# Altium footprint library FootPrintLib_11.PcbLib: 376 footprints (part 16 of 24)
Each footprint in its own frame and in the unit in brackets; x right, y up, seen from the top. Pads: shape width x height; smd on the part's side, far side on the other; paste and mask are expansions set on the pad; w line width, h text height; cw(c..) or ccw(c..) is an arc to the next point about the centre after c.
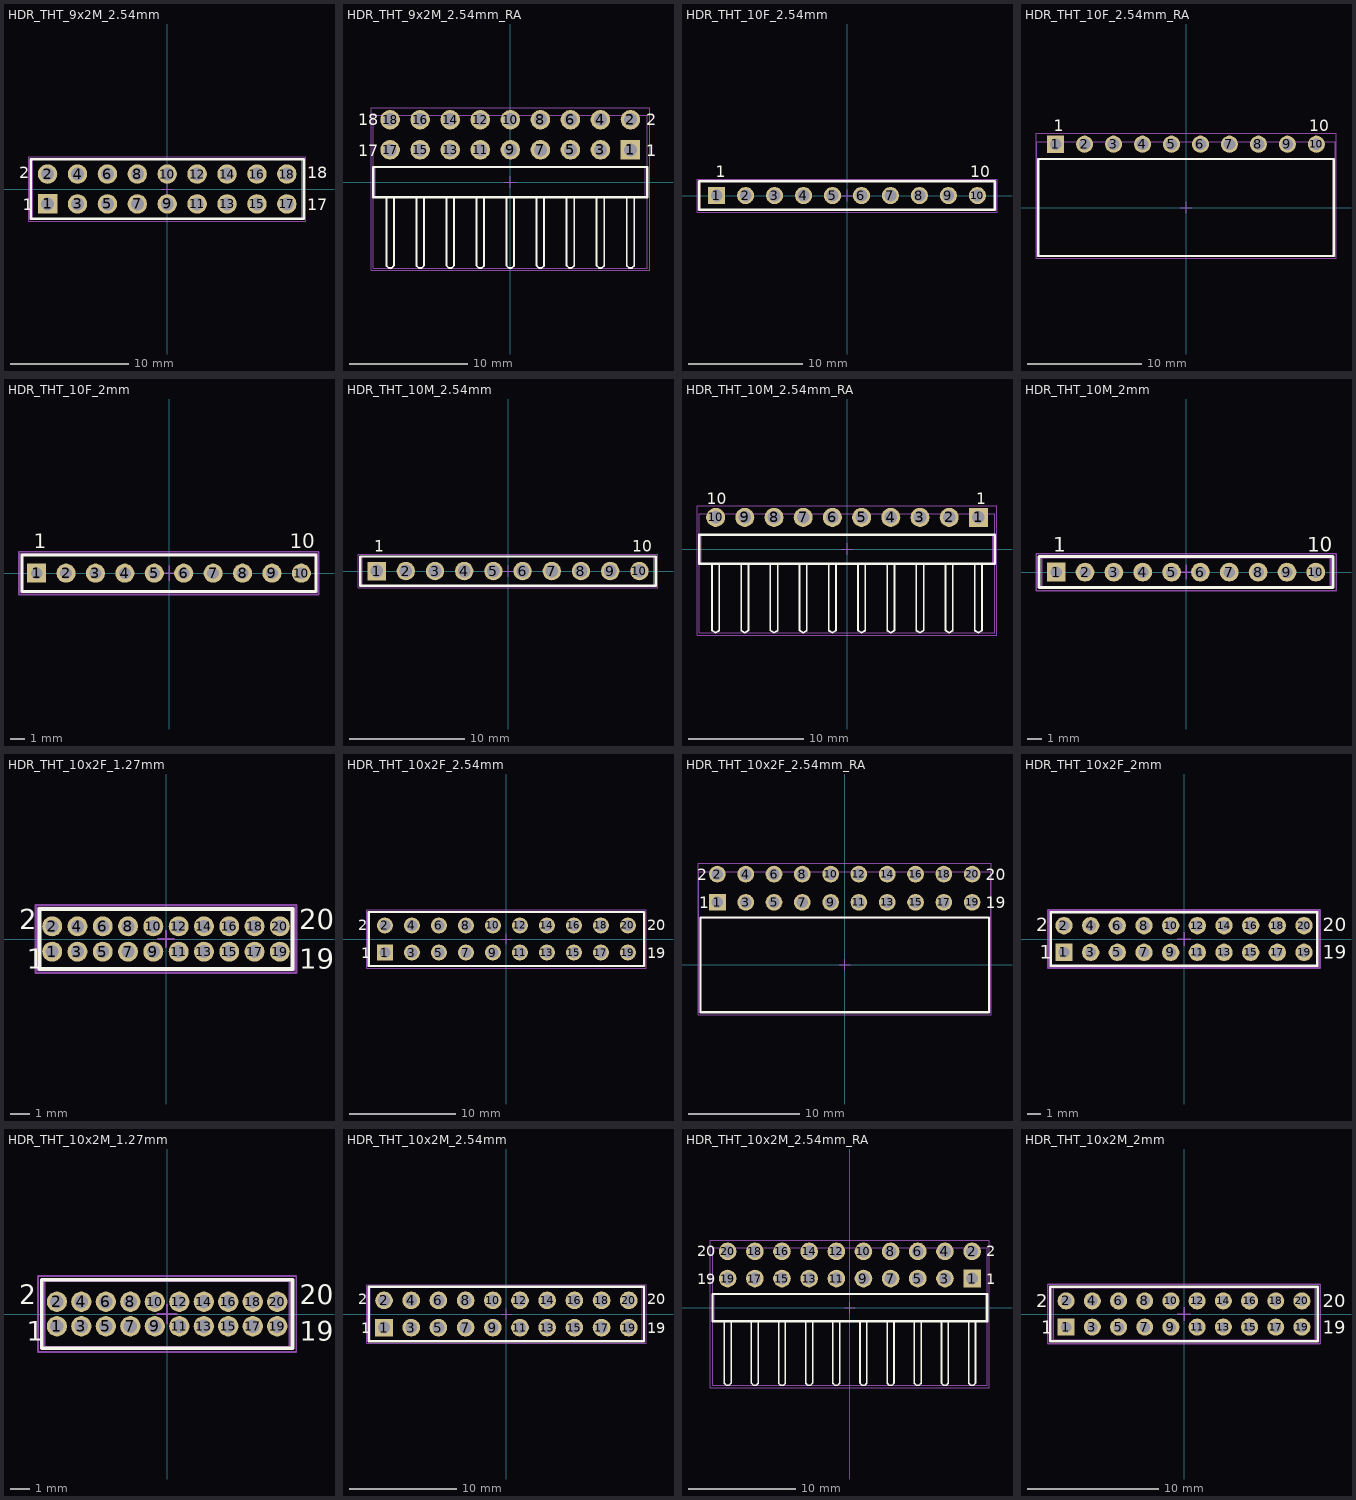
[diagram p15: the footprints below, top view; thin cyan lines are the x and y axes]

## HDR_THT_9x2M_2.54mm [mm] "Pin Header, pitch 2.54 mm, THT, Vertical, dual row, 18p"
height 8.54
pads (18):
  rect 1.65x1.65 hole 1.1: 1(-10.16,-1.27)
  round 1.65 hole 1.1: 2(-10.16,1.27) 3(-7.62,-1.27) 4(-7.62,1.27) 5(-5.08,-1.27) 6(-5.08,1.27) 7(-2.54,-1.27) 8(-2.54,1.27) 9(0,-1.27) 10(0,1.27) 11(2.54,-1.27) 12(2.54,1.27) 13(5.08,-1.27) 14(5.08,1.27) 15(7.62,-1.27) 16(7.62,1.27) 17(10.16,-1.27) 18(10.16,1.27)
Top Overlay:
  lines w0.2: -11.58,-2.54 -11.58,2.54 11.58,2.54 11.58,-2.54 -11.58,-2.54
  text "18" at 11.89,0.9 h1
  text "17" at 11.89,-1.8 h1
  text "2" at -12.59,0.9 h1
  text "1" at -12.29,-1.8 h1
Mechanical 11:
  lines w0.1: -11.43,-2.54 -11.43,2.54 11.43,2.54 11.43,-2.54 -11.43,-2.54
Mechanical 13:
  lines w0.1: -11.58,-2.54 -11.58,2.54 11.58,2.54 11.58,-2.54 -11.58,-2.54
Mechanical 15:
  lines w0.1: -0.5,0 0.5,0 ; 0,-0.5 0,0.5 ; -11.78,-2.74 -11.78,2.74 11.78,2.74 11.78,-2.74 -11.78,-2.74
3D body "61301821121.stp": height 8.59, standoff -2.95, extent -11.43,-2.54 11.43,2.54

## HDR_THT_9x2M_2.54mm_RA [mm] "Pin Header, pitch 2.54 mm, THT, Angled, dual row, 18p"
height 5.08
pads (18):
  rect 1.65x1.65 hole 1.1: 1(10.16,2.73)
  round 1.65 hole 1.1: 2(10.16,5.27) 3(7.62,2.73) 4(7.62,5.27) 5(5.08,2.73) 6(5.08,5.27) 7(2.54,2.73) 8(2.54,5.27) 9(0,2.73) 10(0,5.27) 11(-2.54,2.73) 12(-2.54,5.27) 13(-5.08,2.73) 14(-5.08,5.27) 15(-7.62,2.73) 16(-7.62,5.27) 17(-10.16,2.73) 18(-10.16,5.27)
Top Overlay:
  lines w0.15: -10.48,-1.335 -10.48,-7.07 -10.28,-7.27 -10.04,-7.27 -9.84,-7.07 -9.84,-1.31 ; -7.94,-1.335 -7.94,-7.07 -7.74,-7.27 -7.5,-7.27 -7.3,-7.07 -7.3,-1.31 ; -5.4,-1.335 -5.4,-7.07 -5.2,-7.27 -4.96,-7.27 -4.76,-7.07 -4.76,-1.31 ; -2.86,-1.335 -2.86,-7.07 -2.66,-7.27 -2.42,-7.27 -2.22,-7.07 -2.22,-1.31 ; -0.32,-1.335 -0.32,-7.07 -0.12,-7.27 0.12,-7.27 0.32,-7.07 0.32,-1.31 ; 2.22,-1.335 2.22,-7.07 2.42,-7.27 2.66,-7.27 2.86,-7.07 2.86,-1.31 ; 4.76,-1.335 4.76,-7.07 4.96,-7.27 5.2,-7.27 5.4,-7.07 5.4,-1.31 ; 7.3,-1.335 7.3,-7.07 7.5,-7.27 7.74,-7.27 7.94,-7.07 7.94,-1.31 ; 9.84,-1.335 9.84,-7.07 10.04,-7.27 10.28,-7.27 10.48,-7.07 10.48,-1.31
  lines w0.2: -11.58,-1.27 11.58,-1.27 11.58,1.27 -11.58,1.27 -11.58,-1.27
  text "2" at 11.49,4.8 h1
  text "1" at 11.49,2.2 h1
  text "18" at -12.88,4.8 h1
  text "17" at -12.88,2.2 h1
Mechanical 11:
  lines w0.1: -11.43,-1.27 11.43,-1.27 11.43,1.27 -11.43,1.27 -11.43,-1.27
Mechanical 13:
  lines w0.1: -11.58,-7.27 -11.58,5.63 11.58,5.63 11.58,-7.27 -11.58,-7.27
Mechanical 15:
  lines w0.1: -0.5,0 0.5,0 ; 0,-0.5 0,0.5 ; -11.78,-7.47 -11.78,6.295 11.78,6.295 11.78,-7.47 -11.78,-7.47
3D body "61301821021.stp": height 5.14, standoff -2.94, extent -11.43,-7.27 11.43,5.63

## HDR_THT_10F_2.54mm [mm] "Socket Header, Pitch 2.54 mm, THT, Vertical, single row, 10p"
height 8.5
pads (10):
  rect 1.5x1.5 hole 1.02: 1(-11.43,0)
  round 1.5 hole 1.02: 2(-8.89,0) 3(-6.35,0) 4(-3.81,0) 5(-1.27,0) 6(1.27,0) 7(3.81,0) 8(6.35,0) 9(8.89,0) 10(11.43,0)
Top Overlay:
  lines w0.2: -12.95,-1.25 -12.95,1.25 12.95,1.25 12.95,-1.25 -12.95,-1.25
  text "1" at -11.52,1.6 h1
  text "10" at 10.8,1.6 h1
Mechanical 11:
  lines w0.1: -12.95,-1.25 -12.95,1.25 12.95,1.25 12.95,-1.25 -12.95,-1.25
Mechanical 13:
  lines w0.1: -13.075,-1.25 13.075,-1.25 13.075,1.25 -13.075,1.25 -13.075,-1.25
Mechanical 15:
  lines w0.1: -0.5,0 0.5,0 ; 0,-0.5 0,0.5 ; -13.15,-1.45 13.15,-1.45 13.15,1.45 -13.15,1.45 -13.15,-1.45
3D body "61301011821.stp": height 8.55, standoff -3.06, extent -12.95,-1.25 12.95,1.25

## HDR_THT_10F_2.54mm_RA [mm] "Socket Header, Pitch 2.54 mm, THT, Angled, single row, 10p"
height 2.5
pads (10):
  rect 1.5x1.5 hole 1.02: 1(-11.43,5.55)
  round 1.5 hole 1.02: 2(-8.89,5.55) 3(-6.35,5.55) 4(-3.81,5.55) 5(-1.27,5.55) 6(1.27,5.55) 7(3.81,5.55) 8(6.35,5.55) 9(8.89,5.55) 10(11.43,5.55)
Top Overlay:
  lines w0.2: -12.95,-4.25 -12.95,4.25 12.95,4.25 12.95,-4.25 -12.95,-4.25
  text "10" at 10.8,6.7 h1
  text "1" at -11.59,6.7 h1
Mechanical 11:
  lines w0.1: -12.95,-4.25 12.95,-4.25 12.95,4.25 -12.95,4.25 -12.95,-4.25
Mechanical 13:
  lines w0.1: -13.075,-4.25 -13.075,5.75 13.075,5.75 13.075,-4.25 -13.075,-4.25
Mechanical 15:
  lines w0.1: -0.5,0 0.5,0 ; 0,-0.5 0,0.5 ; -13.15,-4.45 -13.15,6.5 13.15,6.5 13.15,-4.45 -13.15,-4.45
3D body "613010143121.stp": height 2.55, standoff -3.04, extent -12.95,-4.25 12.95,5.75

## HDR_THT_10F_2mm [mm] "Socket Header, Pitch 2.00 mm, THT, Vertical, single row, 10p"
height 4.45
pads (10):
  rect 1.3x1.3 hole 0.8: 1(-9,0)
  round 1.3 hole 0.8: 2(-7,0) 3(-5,0) 4(-3,0) 5(-1,0) 6(1,0) 7(3,0) 8(5,0) 9(7,0) 10(9,0)
Top Overlay:
  lines w0.2: -10,-1.25 -10,1.25 10,1.25 10,-1.25 -10,-1.25
  text "10" at 8.2,1.7 h1
  text "1" at -9.2,1.7 h1
Mechanical 11:
  lines w0.1: -10,-1.25 -10,1.25 10,1.25 10,-1.25 -10,-1.25
Mechanical 13:
  lines w0.1: -10.15,-1.325 -10.15,1.325 10.15,1.325 10.15,-1.325 -10.15,-1.325
Mechanical 15:
  lines w0.1: -0.5,0 0.5,0 ; 0,-0.5 0,0.5 ; -10.2,-1.45 -10.2,1.45 10.2,1.45 10.2,-1.45 -10.2,-1.45
3D body "62001011821.stp": height 4.35, standoff -2.65, extent -10.25,-1.25 10.25,1.25

## HDR_THT_10M_2.54mm [mm] "Pin Header, pitch 2.54 mm, THT, Vertical, single row, 10p"
height 8.54
pads (10):
  rect 1.6x1.6 hole 1.1: 1(-11.43,0)
  round 1.6 hole 1.1: 2(-8.89,0) 3(-6.35,0) 4(-3.81,0) 5(-1.27,0) 6(1.27,0) 7(3.81,0) 8(6.35,0) 9(8.89,0) 10(11.43,0)
Top Overlay:
  lines w0.2: -12.85,-1.27 12.85,-1.27 12.85,1.27 -12.85,1.27 -12.85,-1.27
  text "1" at -11.62,1.7 h1
  text "10" at 10.8,1.7 h1
Mechanical 11:
  lines w0.1: -12.7,-1.27 -12.7,1.27 12.7,1.27 12.7,-1.27 -12.7,-1.27
Mechanical 13:
  lines w0.1: -12.85,-1.27 12.85,-1.27 12.85,1.27 -12.85,1.27 -12.85,-1.27
Mechanical 15:
  lines w0.1: -0.5,0 0.5,0 ; 0,-0.5 0,0.5 ; -13.05,-1.47 13.05,-1.47 13.05,1.47 -13.05,1.47 -13.05,-1.47
3D body "61301011121.stp": height 8.57, standoff -2.97, extent -12.7,-1.27 12.7,1.27

## HDR_THT_10M_2.54mm_RA [mm] "Pin Header, pitch 2.54 mm, THT, Angled, single row, 10p"
height 2.54
pads (10):
  rect 1.65x1.65 hole 1.1: 1(11.43,2.77)
  round 1.65 hole 1.1: 2(8.89,2.77) 3(6.35,2.77) 4(3.81,2.77) 5(1.27,2.77) 6(-1.27,2.77) 7(-3.81,2.77) 8(-6.35,2.77) 9(-8.89,2.77) 10(-11.43,2.77)
Top Overlay:
  lines w0.15: -11.75,-1.27 -11.75,-7.07 -11.43,-7.27 -11.11,-7.07 -11.11,-1.27 ; -9.21,-1.27 -9.21,-7.07 -8.89,-7.27 -8.57,-7.07 -8.57,-1.27 ; -6.67,-1.27 -6.67,-7.07 -6.35,-7.27 -6.03,-7.07 -6.03,-1.27 ; -4.13,-1.27 -4.13,-7.07 -3.81,-7.27 -3.49,-7.07 -3.49,-1.27 ; -1.59,-1.27 -1.59,-7.07 -1.27,-7.27 -0.95,-7.07 -0.95,-1.27 ; 0.95,-1.27 0.95,-7.07 1.27,-7.27 1.59,-7.07 1.59,-1.27 ; 3.49,-1.27 3.49,-7.07 3.81,-7.27 4.13,-7.07 4.13,-1.27 ; 6.03,-1.27 6.03,-7.07 6.35,-7.27 6.67,-7.07 6.67,-1.27 ; 8.57,-1.27 8.57,-7.07 8.89,-7.27 9.21,-7.07 9.21,-1.27 ; 11.11,-1.27 11.11,-7.07 11.43,-7.27 11.75,-7.07 11.75,-1.27
  lines w0.2: -12.85,-1.27 12.85,-1.27 12.85,1.27 -12.85,1.27 -12.85,-1.27
  text "10" at -12.2,3.9 h1
  text "1" at 11.26,3.9 h1
Mechanical 11:
  lines w0.1: -12.7,-1.27 12.7,-1.27 12.7,1.27 -12.7,1.27 -12.7,-1.27
Mechanical 13:
  lines w0.1: -12.85,-7.27 -12.85,3.09 12.85,3.09 12.85,-7.27 -12.85,-7.27
Mechanical 15:
  lines w0.1: -0.5,0 0.5,0 ; 0,-0.5 0,0.5 ; -13.05,-7.47 -13.05,3.795 13.05,3.795 13.05,-7.47 -13.05,-7.47
3D body "61301011021.stp": height 2.62, standoff -2.92, extent -12.7,-7.27 12.7,3.09

## HDR_THT_10M_2mm [mm] "Pin Header, pitch 2.00 mm, THT, Vertical, single row, 10p"
height 6.35
pads (10):
  rect 1.3x1.3 hole 0.8: 1(-9,0)
  round 1.3 hole 0.8: 2(-7,0) 3(-5,0) 4(-3,0) 5(-1,0) 6(1,0) 7(3,0) 8(5,0) 9(7,0) 10(9,0)
Top Overlay:
  lines w0.2: -10.2,-1.075 10.2,-1.075 10.2,1.075 -10.2,1.075 -10.2,-1.075
  text "10" at 8.4,1.4 h1
  text "1" at -9.2,1.4 h1
Mechanical 11:
  lines w0.1: -10,-1 -10,1 10,1 10,-1 -10,-1
Mechanical 13:
  lines w0.1: -10.2,-1.075 10.2,-1.075 10.2,1.075 -10.2,1.075 -10.2,-1.075
Mechanical 15:
  lines w0.1: -0.5,0 0.5,0 ; 0,-0.5 0,0.5 ; -10.4,-1.275 10.4,-1.275 10.4,1.275 -10.4,1.275 -10.4,-1.275
3D body "62001011121.stp": height 6.05, standoff -2.65, extent -10,-1 10,1

## HDR_THT_10x2F_1.27mm [mm] "Socket Header, Pitch 1.27 mm, THT, Vertical, dual row, 20p"
height 4.65
pads (20):
  round 1 hole 0.65: 1(-5.715,-0.635) 2(-5.715,0.635) 3(-4.445,-0.635) 4(-4.445,0.635) 5(-3.175,-0.635) 6(-3.175,0.635) 7(-1.905,-0.635) 8(-1.905,0.635) 9(-0.635,-0.635) 10(-0.635,0.635) 11(0.635,-0.635) 12(0.635,0.635) 13(1.905,-0.635) 14(1.905,0.635) 15(3.175,-0.635) 16(3.175,0.635) 17(4.445,-0.635) 18(4.445,0.635) 19(5.715,-0.635) 20(5.715,0.635)
Top Overlay:
  lines w0.2: -6.35,-1.5 6.35,-1.5 6.35,1.5 -6.35,1.5 -6.35,-1.5
  text "2" at -7.38,0.5 h1
  text "1" at -6.98,-1.5 h1
  text "19" at 6.68,-1.5 h1
  text "20" at 6.68,0.5 h1
Mechanical 11:
  lines w0.1: -6.35,-1.5 6.35,-1.5 6.35,1.5 -6.35,1.5 -6.35,-1.5
Mechanical 13:
  lines w0.1: -6.475,-1.575 -6.475,1.575 6.475,1.575 6.475,-1.575 -6.475,-1.575
Mechanical 15:
  lines w0.1: -0.4,0 0.4,0 ; 0,-0.4 0,0.4 ; -6.55,-1.7 6.55,-1.7 6.55,1.7 -6.55,1.7 -6.55,-1.7
3D body "62202021821.stp": height 4.55, standoff -2.15, extent -6.55,-1.5 6.55,1.5

## HDR_THT_10x2F_2.54mm [mm] "Socket Header, Pitch 2.54 mm, THT, Vertical, dual row, 20p"
height 8.4
pads (20):
  rect 1.5x1.5 hole 1.02: 1(-11.43,-1.27)
  round 1.5 hole 1.02: 2(-11.43,1.27) 3(-8.89,-1.27) 4(-8.89,1.27) 5(-6.35,-1.27) 6(-6.35,1.27) 7(-3.81,-1.27) 8(-3.81,1.27) 9(-1.27,-1.27) 10(-1.27,1.27) 11(1.27,-1.27) 12(1.27,1.27) 13(3.81,-1.27) 14(3.81,1.27) 15(6.35,-1.27) 16(6.35,1.27) 17(8.89,-1.27) 18(8.89,1.27) 19(11.43,-1.27) 20(11.43,1.27)
Top Overlay:
  lines w0.2: -12.95,-2.54 -12.95,2.54 12.95,2.54 12.95,-2.54 -12.95,-2.54
  text "2" at -13.96,0.8 h1
  text "1" at -13.66,-1.8 h1
  text "19" at 13.26,-1.8 h1
  text "20" at 13.26,0.8 h1
Mechanical 11:
  lines w0.1: -12.95,-2.54 12.95,-2.54 12.95,2.54 -12.95,2.54 -12.95,-2.54
Mechanical 13:
  lines w0.1: -13.075,-2.54 -13.075,2.54 13.075,2.54 13.075,-2.54 -13.075,-2.54
Mechanical 15:
  lines w0.1: -0.5,0 0.5,0 ; 0,-0.5 0,0.5 ; -13.15,-2.74 -13.15,2.74 13.15,2.74 13.15,-2.74 -13.15,-2.74
3D body "61302021821.stp": height 8.45, standoff -3.05, extent -12.95,-2.54 12.95,2.54

## HDR_THT_10x2F_2.54mm_RA [mm] "Socket Header, Pitch 2.54 mm, THT, Angled, dual row, 20p"
height 5.08
pads (20):
  rect 1.5x1.5 hole 1.02: 1(-11.43,5.61)
  round 1.5 hole 1.02: 2(-11.43,8.15) 3(-8.89,5.61) 4(-8.89,8.15) 5(-6.35,5.61) 6(-6.35,8.15) 7(-3.81,5.61) 8(-3.81,8.15) 9(-1.27,5.61) 10(-1.27,8.15) 11(1.27,5.61) 12(1.27,8.15) 13(3.81,5.61) 14(3.81,8.15) 15(6.35,5.61) 16(6.35,8.15) 17(8.89,5.61) 18(8.89,8.15) 19(11.43,5.61) 20(11.43,8.15)
Top Overlay:
  lines w0.2: -12.95,-4.25 12.95,-4.25 12.95,4.25 -12.95,4.25 -12.95,-4.25
  text "1" at -13.06,5.1 h1
  text "2" at -13.26,7.6 h1
  text "19" at 12.66,5.1 h1
  text "20" at 12.66,7.6 h1
Mechanical 11:
  lines w0.1: -12.95,-4.25 -12.95,4.25 12.95,4.25 12.95,-4.25 -12.95,-4.25
Mechanical 13:
  lines w0.1: -13.1,-4.25 -13.1,8.35 13.1,8.35 13.1,-4.25 -13.1,-4.25
Mechanical 15:
  lines w0.1: -0.5,0 0.5,0 ; 0,-0.5 0,0.5 ; -13.15,-4.45 -13.15,9.1 13.15,9.1 13.15,-4.45 -13.15,-4.45
3D body "613020243121.stp": height 5.05, standoff -3.25, extent -12.95,-4.25 12.95,8.35

## HDR_THT_10x2F_2mm [mm] "Socket Header, Pitch 2.00 mm, THT, Vertical, dual row, 20p"
height 4.45
pads (20):
  rect 1.3x1.3 hole 0.8: 1(-9,-1)
  round 1.3 hole 0.8: 2(-9,1) 3(-7,-1) 4(-7,1) 5(-5,-1) 6(-5,1) 7(-3,-1) 8(-3,1) 9(-1,-1) 10(-1,1) 11(1,-1) 12(1,1) 13(3,-1) 14(3,1) 15(5,-1) 16(5,1) 17(7,-1) 18(7,1) 19(9,-1) 20(9,1)
Top Overlay:
  lines w0.2: -10,-2 10,-2 10,2 -10,2 -10,-2
  text "2" at -11.1,0.6 h1
  text "1" at -10.8,-1.5 h1
  text "20" at 10.4,0.6 h1
  text "19" at 10.4,-1.5 h1
Mechanical 11:
  lines w0.1: -10,-2 10,-2 10,2 -10,2 -10,-2
Mechanical 13:
  lines w0.1: -10.15,-2.075 10.15,-2.075 10.15,2.075 -10.15,2.075 -10.15,-2.075
Mechanical 15:
  lines w0.1: -0.5,0 0.5,0 ; 0,-0.5 0,0.5 ; -10.2,-2.2 10.2,-2.2 10.2,2.2 -10.2,2.2 -10.2,-2.2
3D body "62002021821.stp": height 4.35, standoff -2.35, extent -10.25,-2 10.25,2

## HDR_THT_10x2M_1.27mm [mm] "Pin Header, pitch 1.27 mm, THT, Vertical, dual row, 20p"
height 5.65
pads (20):
  round 1.05 hole 0.7: 1(-5.715,-0.635) 2(-5.715,0.635) 3(-4.445,-0.635) 4(-4.445,0.635) 5(-3.175,-0.635) 6(-3.175,0.635) 7(-1.905,-0.635) 8(-1.905,0.635) 9(-0.635,-0.635) 10(-0.635,0.635) 11(0.635,-0.635) 12(0.635,0.635) 13(1.905,-0.635) 14(1.905,0.635) 15(3.175,-0.635) 16(3.175,0.635) 17(4.445,-0.635) 18(4.445,0.635) 19(5.715,-0.635) 20(5.715,0.635)
Top Overlay:
  lines w0.2: -6.5,-1.775 -6.5,1.775 6.5,1.775 6.5,-1.775 -6.5,-1.775
  text "1" at -7.28,-1.4 h1
  text "2" at -7.68,0.5 h1
  text "19" at 6.88,-1.4 h1
  text "20" at 6.88,0.5 h1
Mechanical 11:
  lines w0.1: -6.35,-1.7 -6.35,1.7 6.35,1.7 6.35,-1.7 -6.35,-1.7
Mechanical 13:
  lines w0.1: -6.5,-1.775 -6.5,1.775 6.5,1.775 6.5,-1.775 -6.5,-1.775
Mechanical 15:
  lines w0.1: -0.5,0 0.5,0 ; 0,-0.5 0,0.5 ; -6.7,-1.975 6.7,-1.975 6.7,1.975 -6.7,1.975 -6.7,-1.975
3D body "62202021121.stp": height 5.33, standoff -2.27, extent -6.35,-1.7 6.35,1.7

## HDR_THT_10x2M_2.54mm [mm] "Pin Header, pitch 2.54 mm, THT, Vertical, dual row, 20p"
height 8.54
pads (20):
  rect 1.65x1.65 hole 1.1: 1(-11.43,-1.27)
  round 1.65 hole 1.1: 2(-11.43,1.27) 3(-8.89,-1.27) 4(-8.89,1.27) 5(-6.35,-1.27) 6(-6.35,1.27) 7(-3.81,-1.27) 8(-3.81,1.27) 9(-1.27,-1.27) 10(-1.27,1.27) 11(1.27,-1.27) 12(1.27,1.27) 13(3.81,-1.27) 14(3.81,1.27) 15(6.35,-1.27) 16(6.35,1.27) 17(8.89,-1.27) 18(8.89,1.27) 19(11.43,-1.27) 20(11.43,1.27)
Top Overlay:
  lines w0.2: -12.85,-2.54 12.85,-2.54 12.85,2.54 -12.85,2.54 -12.85,-2.54
  text "1" at -13.56,-1.8 h1
  text "2" at -13.86,0.9 h1
  text "19" at 13.16,-1.8 h1
  text "20" at 13.16,0.9 h1
Mechanical 11:
  lines w0.1: -12.7,-2.54 12.7,-2.54 12.7,2.54 -12.7,2.54 -12.7,-2.54
Mechanical 13:
  lines w0.1: -12.85,-2.54 12.85,-2.54 12.85,2.54 -12.85,2.54 -12.85,-2.54
Mechanical 15:
  lines w0.1: -0.5,0 0.5,0 ; 0,-0.5 0,0.5 ; -13.05,-2.74 13.05,-2.74 13.05,2.74 -13.05,2.74 -13.05,-2.74
3D body "61302021121.stp": height 8.59, standoff -2.95, extent -12.7,-2.54 12.7,2.54

## HDR_THT_10x2M_2.54mm_RA [mm] "Pin Header, pitch 2.54 mm, THT, Angled, dual row, 20p"
height 5.08
pads (20):
  rect 1.65x1.65 hole 1.1: 1(11.43,2.73)
  round 1.65 hole 1.1: 2(11.43,5.27) 3(8.89,2.73) 4(8.89,5.27) 5(6.35,2.73) 6(6.35,5.27) 7(3.81,2.73) 8(3.81,5.27) 9(1.27,2.73) 10(1.27,5.27) 11(-1.27,2.73) 12(-1.27,5.27) 13(-3.81,2.73) 14(-3.81,5.27) 15(-6.35,2.73) 16(-6.35,5.27) 17(-8.89,2.73) 18(-8.89,5.27) 19(-11.43,2.73) 20(-11.43,5.27)
Top Overlay:
  lines w0.15: -11.75,-1.335 -11.75,-7.07 -11.55,-7.27 -11.31,-7.27 -11.11,-7.07 -11.11,-1.31 ; -9.21,-1.335 -9.21,-7.07 -9.01,-7.27 -8.77,-7.27 -8.57,-7.07 -8.57,-1.31 ; -6.67,-1.335 -6.67,-7.07 -6.47,-7.27 -6.23,-7.27 -6.03,-7.07 -6.03,-1.31 ; -4.13,-1.335 -4.13,-7.07 -3.93,-7.27 -3.69,-7.27 -3.49,-7.07 -3.49,-1.31 ; -1.59,-1.335 -1.59,-7.07 -1.39,-7.27 -1.15,-7.27 -0.95,-7.07 -0.95,-1.31 ; 0.95,-1.335 0.95,-7.07 1.15,-7.27 1.39,-7.27 1.59,-7.07 1.59,-1.31 ; 3.49,-1.335 3.49,-7.07 3.69,-7.27 3.93,-7.27 4.13,-7.07 4.13,-1.31 ; 6.03,-1.335 6.03,-7.07 6.23,-7.27 6.47,-7.27 6.67,-7.07 6.67,-1.31 ; 8.57,-1.335 8.57,-7.07 8.77,-7.27 9.01,-7.27 9.21,-7.07 9.21,-1.31 ; 11.11,-1.335 11.11,-7.07 11.31,-7.27 11.55,-7.27 11.75,-7.07 11.75,-1.31
  lines w0.2: -12.85,-1.27 -12.85,1.27 12.85,1.27 12.85,-1.27 -12.85,-1.27
  text "19" at -14.3,2.2 h1
  text "20" at -14.3,4.8 h1
  text "1" at 12.76,2.2 h1
  text "2" at 12.76,4.8 h1
Mechanical 11:
  lines w0.1: -12.7,-1.27 -12.7,1.27 12.7,1.27 12.7,-1.27 -12.7,-1.27
Mechanical 13:
  lines w0.1: -12.85,-7.27 12.85,-7.27 12.85,5.63 -12.85,5.63 -12.85,-7.27
Mechanical 15:
  lines w0.1: -0.5,0 0.5,0 ; 0,-0.5 0,0.5 ; -13.05,-7.47 13.05,-7.47 13.05,6.295 -13.05,6.295 -13.05,-7.47
3D body "61302021021.stp": height 5.14, standoff -2.94, extent -12.7,-7.27 12.7,5.63

## HDR_THT_10x2M_2mm [mm] "2.00 mm THT Dual Pin Header, 20p"
height 6
pads (20):
  rect 1.3x1.3 hole 0.8: 1(-9,-1)
  round 1.3 hole 0.8: 2(-9,1) 3(-7,-1) 4(-7,1) 5(-5,-1) 6(-5,1) 7(-3,-1) 8(-3,1) 9(-1,-1) 10(-1,1) 11(1,-1) 12(1,1) 13(3,-1) 14(3,1) 15(5,-1) 16(5,1) 17(7,-1) 18(7,1) 19(9,-1) 20(9,1)
Top Overlay:
  lines w0.2: -10.2,-2.075 10.2,-2.075 10.2,2.075 -10.2,2.075 -10.2,-2.075
  text "20" at 10.6,0.5 h1
  text "19" at 10.6,-1.5 h1
  text "2" at -11.3,0.5 h1
  text "1" at -10.9,-1.5 h1
Mechanical 11:
  lines w0.1: -10,-2 10,-2 10,2 -10,2 -10,-2
Mechanical 13:
  lines w0.1: -10.2,-2.075 10.2,-2.075 10.2,2.075 -10.2,2.075 -10.2,-2.075
Mechanical 15:
  lines w0.1: -0.5,0 0.5,0 ; 0,-0.5 0,0.5 ; -10.4,-2.275 10.4,-2.275 10.4,2.275 -10.4,2.275 -10.4,-2.275
3D body "62002021121.stp": height 6.05, standoff -2.65, extent -10,-2 10,2